# Altium footprint library SamacSys.PcbLib: 1008 footprints (part 10 of 63)
Each footprint in its own frame and in the unit in brackets; x right, y up, seen from the top. Pads: shape width x height; smd on the part's side, far side on the other; paste and mask are expansions set on the pad; w line width, h text height; cw(c..) or ccw(c..) is an arc to the next point about the centre after c.
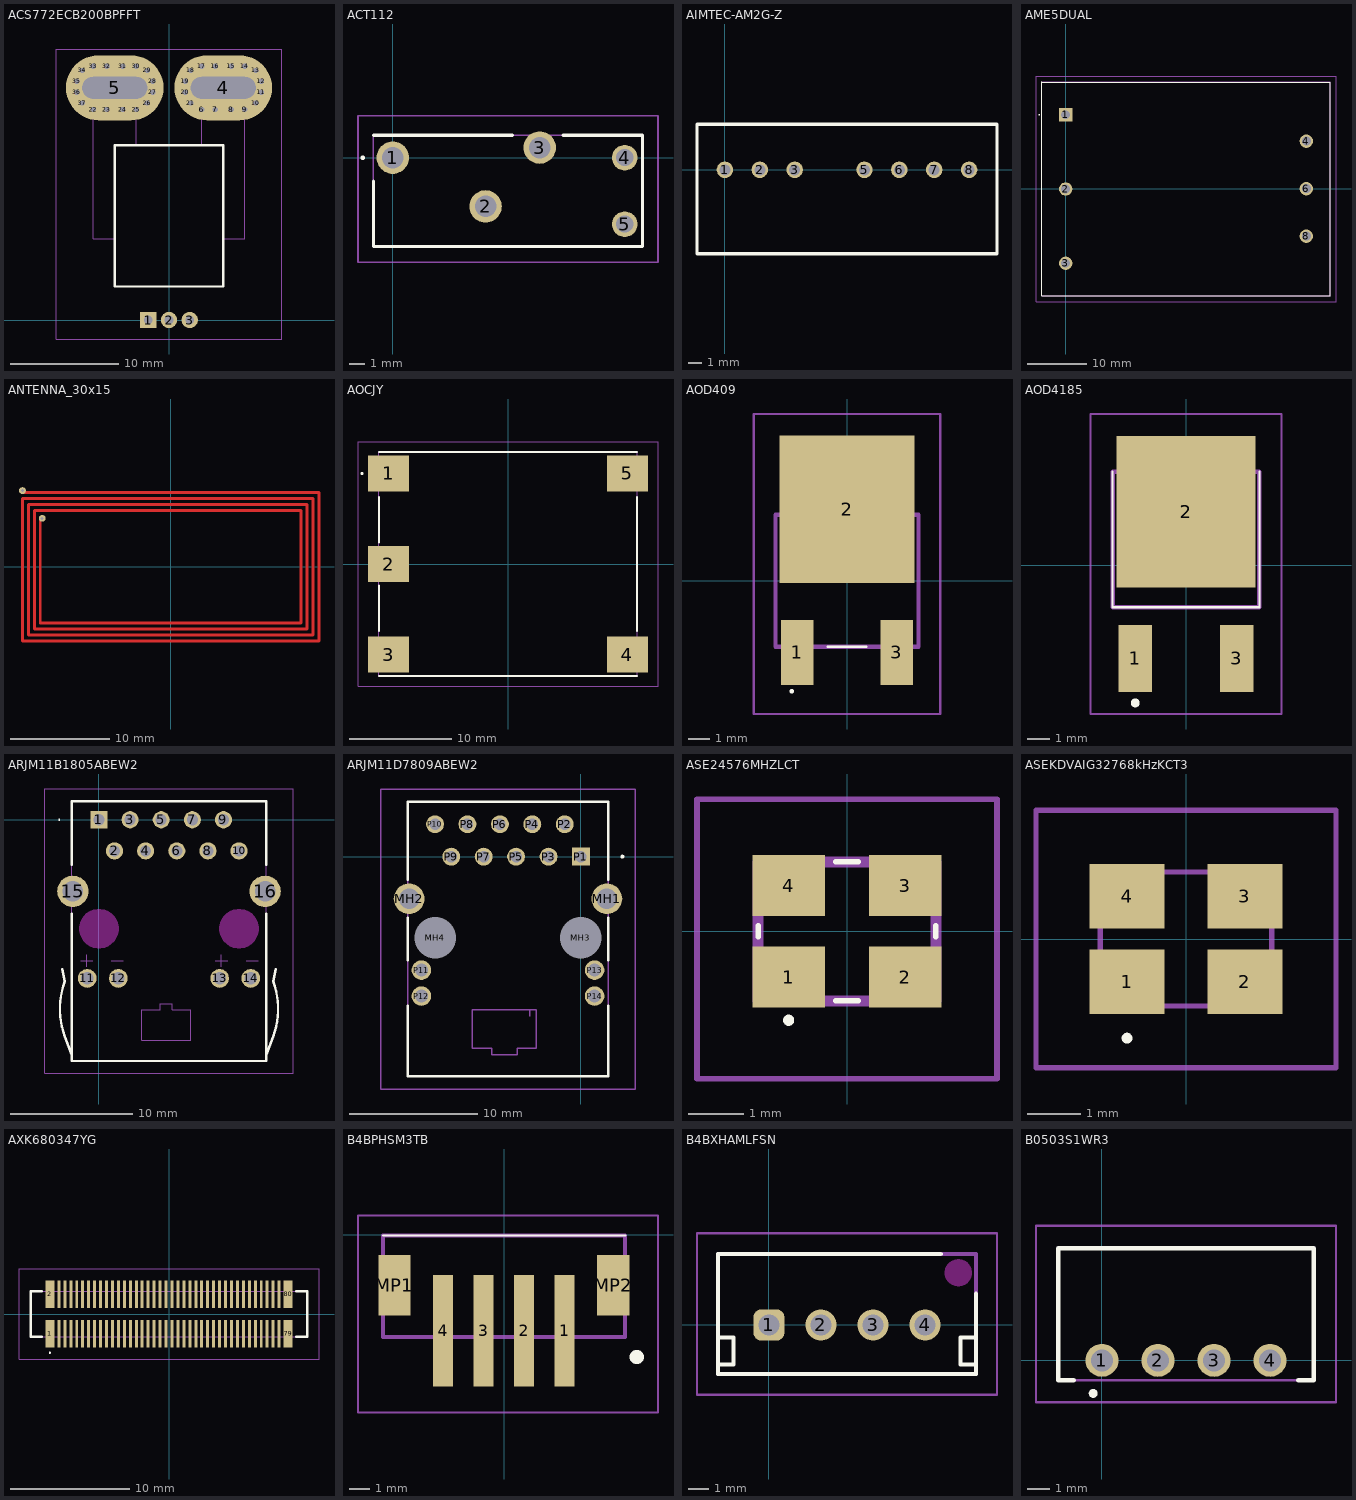
[diagram p9: the footprints below, top view; thin cyan lines are the x and y axes]

## ACS772ECB200BPFFT [mm]
pads (37):
  rect 1.5x1.5 hole 0.8: 1(-1.91,0)
  round 1.5 hole 0.8: 2(0,0) 3(1.91,0)
  oval 9x6 hole 2 slot 6 at 0 deg: 4(5,21.4) 5(-5,21.4)
  round 0.9 hole 0.5: 6(3,19.4) 7(4.25,19.4) 8(5.75,19.4) 9(7,19.4) 10(8,20) 11(8.5,21) 12(8.5,22) 13(8,23) 14(7,23.4) 15(5.75,23.4) 16(4.25,23.4) 17(3,23.4) 18(2,23) 19(1.5,22) 20(1.5,21) 21(2,20) 22(-7,19.4) 23(-5.75,19.4) 24(-4.25,19.4) 25(-3,19.4) 26(-2,20) 27(-1.5,21) 28(-1.5,22) 29(-2,23) 30(-3,23.4) 31(-4.25,23.4) 32(-5.75,23.4) 33(-7,23.4) 34(-8,23) 35(-8.5,22) 36(-8.5,21) 37(-8,20)
Top Overlay:
  lines w0.2: -5,3.1 5,3.1 5,16.1 -5,16.1 -5,3.1
Assembly:
  lines w0.1: -5,7.5 -7,7.5 -7,20.3 -3,20.3 -3,16.1 ; 3,16.1 3,20.3 7,20.3 7,7.5 5,7.5 ; -7,20.4 cw(c-7,21.4) -7,22.4 -3,22.4 cw(c-3,21.4) -3,20.4 -7,20.4 ; -5,3.1 5,3.1 5,16.1 -5,16.1 -5,3.1 ; 3,20.4 cw(c3,21.4) 3,22.4 7,22.4 cw(c7,21.4) 7,20.4 3,20.4
Countryard:
  lines w0.1: -10.402,-1.75 10.402,-1.75 10.402,24.95 -10.402,24.95 -10.402,-1.75
3D body "ACS758LCB-100B-PFF-T.stp": height 6.97, standoff -3.57, extent -6.972,-0.484 7.028,22.333

## ACT112 [mm]
pads (5):
  round 2.1 hole 1.4: 1(0,0) 2(6,-3.15) 3(9.5,0.65)
  round 1.65 hole 1.1: 4(15,0) 5(15,-4.3)
Top Overlay:
  lines w0.2: -2,0 cw(c-1.95,0) -1.9,0 ; -2,0 ccw(c-1.95,0) -1.9,0 ; -2,0 cw(c-1.95,0) -1.9,0 ; -1.25,-5.75 -1.25,-1.5 -1.25,-5.75 ; -1.25,-5.75 16.15,-5.75 ; -1.25,-5.75 16.15,-5.75 ; 16.15,-5.75 16.15,1.45 ; 16.15,-5.75 16.15,1.45 ; 16.15,1.45 11,1.45 16.15,1.45 ; -1.25,1.45 7.75,1.45 -1.25,1.45
Assembly:
  lines w0.1: -1.25,-5.75 -1.25,1.45 16.15,1.45 16.15,-5.75 -1.25,-5.75
Countryard:
  lines w0.1: -2.25,-6.75 -2.25,2.7 17.15,2.7 17.15,-6.75 -2.25,-6.75
3D body "ACT112.stp": height 13.9, standoff -5, extent -1.25,-5.75 16.15,1.45

## AIMTEC-AM2G-Z [mm]
height 10.6
pads (7):
  round 1.2 hole 0.8: 1(0,0) 2(2.54,0) 3(5.08,0) 5(10.16,0) 6(12.7,0) 7(15.24,0) 8(17.78,0)
Top Overlay:
  lines w0.254: -2.032,-6.096 -2.032,3.302 19.812,3.302 19.812,-6.096 -2.032,-6.096
Top Designator:
  text ".Designator" at 1.272,-1.905 h1.52
3D body "SIP-8.step": height 11.1, standoff -3.6, extent -2,-6 19.8,3.2

## AME5DUAL [mm]
pads (6):
  rect 2.25x2.25 hole 1.5: 1(0,12.446)
  round 2.25 hole 1.5: 2(0,-0.054) 3(0,-12.554) 4(40.5,8) 6(40.5,0) 8(40.5,-8)
Top Overlay:
  lines w0.1: -4.5,12.446 ccw(c-4.45,12.446) -4.4,12.446 ccw(c-4.45,12.446) -4.5,12.446
  lines w0.2: -4,-18.054 44.5,-18.054 44.5,17.946 -4,17.946 ; -4,-18 -4,18
Assembly:
  lines w0.1: -4,-18.054 -4,17.946 ; -4,-18 44.5,-18 44.5,18 -4,18
Countryard:
  lines w0.1: -5,-19.054 -5,18.946 45.5,18.946 45.5,-19.054 -5,-19.054
3D body "AME5-12SVZ.stp": height 21.1, standoff -5, extent -4,-18.054 44.5,17.946

## ANTENNA_30x15 [mm] "13.56MHz antenna 30*15mm"
pads (2):
  round 0.7 hole 0.3: 1(-15,7.7) 2(-13,4.9)
Top Layer:
  lines w0.3: -15,7.5 15,7.5 15,-7.5 -15,-7.5 -15,6.9 -13,6.9 14.4,6.9 14.4,-6.9 -14.4,-6.9 -14.4,6.3 13.8,6.3 13.8,-6.3 -13.8,-6.3 -13.8,5.7 13.2,5.7 13.2,-5.7 -13.2,-5.7 -13.2,4.9

## AOCJY [mm]
pads (5):
  rect 4x3.5 smd: 1(-11.75,8.9) 2(-11.75,0) 3(-11.75,-8.9) 4(11.75,-8.9) 5(11.75,8.9)
Top Overlay:
  lines w0.2: -12.7,-11 12.7,-11 ; -12.7,-6.6 -12.7,-2.1 ; -12.7,2.1 -12.7,6.6 ; -12.7,11 12.7,11 ; 12.7,-6.6 12.7,6.6 ; -14.4,8.9 cw(c-14.35,8.9) -14.3,8.9 ; -14.4,8.9 ccw(c-14.35,8.9) -14.3,8.9 ; -14.4,8.9 cw(c-14.35,8.9) -14.3,8.9
Assembly:
  lines w0.1: -12.7,-11 -12.7,11 12.7,11 12.7,-11 -12.7,-11
Countryard:
  lines w0.1: -14.75,-12 -14.75,12 14.75,12 14.75,-12 -14.75,-12
3D body "AOCJY-10.000MHZ.stp": height 12.7, standoff 0, extent -12.7,-11 12.7,11

## AOD409 [mm]
pads (3):
  rect 1.5x3 smd: 1(-2.286,-3.3) 3(2.286,-3.3)
  rect 6.25x6.8 smd: 2(0,3.3)
Top Overlay:
  lines w0.1: -0.9,-3.048 0.9,-3.048 ; -2.6,-5.1 cw(c-2.55,-5.1) -2.5,-5.1 cw(c-2.55,-5.1) -2.6,-5.1
Assembly:
  lines w0.2: -3.302,-3.048 -3.302,3.048 3.302,3.048 3.302,-3.048 -3.302,-3.048
Countryard:
  lines w0.1: -4.302,-6.15 -4.302,7.7 4.302,7.7 4.302,-6.15 -4.302,-6.15
3D body "AOD409.stp": height 2.39, standoff 0, extent -3.293,-4.129 3.293,5.904

## AOD4185 [mm]
pads (3):
  rect 1.5x3 smd: 1(-2.286,-4.2) 3(2.286,-4.2)
  rect 6.25x6.8 smd: 2(0,2.4)
Top Overlay:
  lines w0.1: -3.302,4.2 -3.302,-1.8 -3.302,-1.896 3.302,-1.896 3.302,4.2
  lines w0.2: -2.286,-6.3 ccw(c-2.286,-6.2) -2.286,-6.1 ccw(c-2.286,-6.2) -2.286,-6.3
Assembly:
  lines w0.2: -3.302,-1.896 -3.302,4.2 3.302,4.2 3.302,-1.896 -3.302,-1.896
Countryard:
  lines w0.1: -4.302,-6.7 -4.302,6.8 4.302,6.8 4.302,-6.7 -4.302,-6.7
3D body "AOD4185.stp": height 2.4, standoff 0, extent -3.3,-5 3.3,5.1

## ARJM11B1805ABEW2 [mm]
pads (16):
  rect 1.4x1.4 hole 0.9: 1(0,0)
  round 1.4 hole 0.9: 2(1.27,-2.54) 3(2.54,0) 4(3.81,-2.54) 5(5.08,0) 6(6.35,-2.54) 7(7.62,0) 8(8.89,-2.54) 9(10.16,0) 10(11.43,-2.54)
  round 1.53 hole 1.02: 11(-0.96,-12.95) 12(1.58,-12.95) 13(9.85,-12.95) 14(12.39,-12.95)
  round 2.55 hole 1.7: 15(-2.135,-5.84) 16(13.565,-5.84)
Top Overlay:
  lines w0.1: -3.3,0 cw(c-3.25,0) -3.2,0 cw(c-3.25,0) -3.3,0
  lines w0.2: -2.985,-12.19 -2.785,-13.19 ; -2.786,-17.686 cw(c3.352,-15.44) -2.782,-13.183 ; -2.785,-17.69 -2.235,-19.19 ; -2.235,-7.69 -2.235,-19.69 13.665,-19.69 13.665,-7.69 ; -2.235,-3.69 -2.235,1.51 13.665,1.51 13.665,-3.69 ; 13.665,-19.19 14.215,-17.69 ; 14.213,-13.183 cw(c8.079,-15.44) 14.217,-17.686 ; 14.215,-13.19 14.415,-12.19
Keep-Out Layer:
  board cut-out: -1.6,-8.89 -1.6,-9.048 -1.539,-9.357 -1.418,-9.648 -1.243,-9.91 -1.02,-10.133 -0.758,-10.308 -0.467,-10.429 -0.158,-10.49 0,-10.49 0.158,-10.49 0.467,-10.429 0.758,-10.308 1.02,-10.133 1.243,-9.91 1.418,-9.648 1.539,-9.357 1.6,-9.048 1.6,-8.89 1.6,-8.732 1.539,-8.423 1.418,-8.132 1.243,-7.87 1.02,-7.647 0.758,-7.472 0.467,-7.351 0.158,-7.29 0,-7.29 -0.158,-7.29 -0.467,-7.351 -0.758,-7.472 -1.02,-7.647 -1.243,-7.87 -1.418,-8.132 -1.539,-8.423 -1.6,-8.732
  board cut-out: 9.83,-8.89 9.83,-9.048 9.891,-9.357 10.012,-9.648 10.187,-9.91 10.41,-10.133 10.672,-10.308 10.963,-10.429 11.272,-10.49 11.43,-10.49 11.588,-10.49 11.897,-10.429 12.188,-10.308 12.45,-10.133 12.673,-9.91 12.848,-9.648 12.969,-9.357 13.03,-9.048 13.03,-8.89 13.03,-8.732 12.969,-8.423 12.848,-8.132 12.673,-7.87 12.45,-7.647 12.188,-7.472 11.897,-7.351 11.588,-7.29 11.43,-7.29 11.272,-7.29 10.963,-7.351 10.672,-7.472 10.41,-7.647 10.187,-7.87 10.012,-8.132 9.891,-8.423 9.83,-8.732
Assembly:
  lines w0.1: -2.985,-12.19 -2.785,-13.19 ; -2.786,-17.686 cw(c3.352,-15.44) -2.782,-13.183 ; -2.785,-17.69 -2.235,-19.19 ; -1.5,-11.5 -0.5,-11.5 ; -1,-12 -1,-11 ; 1,-11.5 2,-11.5 ; 9.5,-11.5 10.5,-11.5 ; 10,-12 10,-11 ; 12,-11.5 13,-11.5 ; 13.665,-19.19 14.215,-17.69 ; 14.213,-13.183 cw(c8.079,-15.44) 14.217,-17.686 ; 14.215,-13.19 14.415,-12.19 ; -2.235,-19.69 13.665,-19.69 13.665,1.51 -2.235,1.51 -2.235,-19.69 ; 3.5,-18 3.5,-15.5 5,-15.5 5,-15 6,-15 6,-15.5 7.5,-15.5 7.5,-18 4,-18 3.5,-18
Countryard:
  lines w0.1: -4.41,-20.69 15.84,-20.69 15.84,2.51 -4.41,2.51 -4.41,-20.69
3D body "ARJM11D7-809-AB-EW2.stp": height 14.15, standoff -5, extent -2.735,-19.74 14.165,1.76

## ARJM11D7809ABEW2 [mm]
pads (18):
  round 2.4 hole 1.6: MH1(2.035,-3.3) MH2(-13.465,-3.3)
  round 1.625 hole 3.25 unplated: MH3(0,-6.35) MH4(-11.43,-6.35)
  rect 1.4x1.4 hole 0.9: P1(0,0)
  round 1.4 hole 0.9: P2(-1.27,2.54) P3(-2.54,0) P4(-3.81,2.54) P5(-5.08,0) P6(-6.35,2.54) P7(-7.62,0) P8(-8.89,2.54) P9(-10.16,0) P10(-11.43,2.54)
  round 1.53 hole 1.02: P11(-12.5,-8.89) P12(-12.5,-10.92) P13(1.07,-8.89) P14(1.07,-10.92)
Top Overlay:
  lines w0.2: -13.565,-11.7 -13.565,-17.2 2.135,-17.2 2.135,-11.7 ; -13.565,-8.1 -13.565,-4.8 ; -13.565,-1.8 -13.565,4.3 2.135,4.3 2.135,-1.8 ; 2.135,-8.1 2.135,-4.8 ; 3.2,0 ccw(c3.25,0) 3.3,0 ; 3.2,0 cw(c3.25,0) 3.3,0 ; 3.2,0 ccw(c3.25,0) 3.3,0
Top Assembly:
  lines w0.1: -4,-12.5 -4,-12 ; -8.5,-15 -8.5,-12 -3.5,-12 -3.5,-15 -5,-15 -5,-15.5 -7,-15.5 -7,-15 -8.5,-15
Assembly:
  lines w0.1: -13.565,-17.2 -13.565,4.3 2.135,4.3 2.135,-17.2 -13.565,-17.2
Countryard:
  lines w0.1: -15.665,-18.2 -15.665,5.3 4.235,5.3 4.235,-18.2 -15.665,-18.2
3D body "ARJM11D7-809-AB-EW2.stp": height 14.15, standoff -5, extent -14.165,-17.2 2.735,4.3

## ASE24576MHZLCT [mm]
pads (4):
  rect 1.3x1.1 smd: 1(-1.05,-0.825) 2(1.05,-0.825) 3(1.05,0.825) 4(-1.05,0.825)
Top Overlay:
  lines w0.1: -1.6,-0.1 -1.6,0.1 ; -0.2,-1.25 0.2,-1.25 ; -0.2,1.25 0.2,1.25 ; 1.6,-0.1 1.6,0.1 ; -1.1,-1.6 ccw(c-1.05,-1.6) -1,-1.6 ccw(c-1.05,-1.6) -1.1,-1.6
Assembly:
  lines w0.2: -1.6,-1.25 -1.6,1.25 1.6,1.25 1.6,-1.25 -1.6,-1.25
Countryard:
  lines w0.1: -2.7,-2.65 -2.7,2.375 2.7,2.375 2.7,-2.65 -2.7,-2.65
3D body "ASE-10.000MHZ-LC-T.stp": height 1.2, standoff 0, extent -1.6,-1.25 1.6,1.25

## ASEKDVAIG32768kHzKCT3 [mm]
pads (4):
  rect 1.4x1.2 smd: 1(-1.1,-0.8) 2(1.1,-0.8) 3(1.1,0.8) 4(-1.1,0.8)
Top Overlay:
  lines w0.1: -1.1,-1.9 ccw(c-1.1,-1.85) -1.1,-1.8 ccw(c-1.1,-1.85) -1.1,-1.9
Assembly:
  lines w0.1: -1.6,-1.25 -1.6,1.25 1.6,1.25 1.6,-1.25 -1.6,-1.25
Countryard:
  lines w0.1: -2.8,-2.4 -2.8,2.4 2.8,2.4 2.8,-2.4 -2.8,-2.4
3D body "ASEKDVAIG-32.768kHz-KC-T3.stp": height 1.3, standoff 0, extent -1.68,-1.28 1.68,1.28

## AXK680347YG [mm]
pads (80):
  rect 0.75x2.3 smd: 1(-10,-1.65) 2(-10,1.65) 79(10,-1.65) 80(10,1.65)
  rect 0.25x2.3 smd: 3(-9.25,-1.65) 4(-9.25,1.65) 5(-8.75,-1.65) 6(-8.75,1.65) 7(-8.25,-1.65) 8(-8.25,1.65) 9(-7.75,-1.65) 10(-7.75,1.65) 11(-7.25,-1.65) 12(-7.25,1.65) 13(-6.75,-1.65) 14(-6.75,1.65) 15(-6.25,-1.65) 16(-6.25,1.65) 17(-5.75,-1.65) 18(-5.75,1.65) 19(-5.25,-1.65) 20(-5.25,1.65) 21(-4.75,-1.65) 22(-4.75,1.65) 23(-4.25,-1.65) 24(-4.25,1.65) 25(-3.75,-1.65) 26(-3.75,1.65) 27(-3.25,-1.65) 28(-3.25,1.65) 29(-2.75,-1.65) 30(-2.75,1.65) 31(-2.25,-1.65) 32(-2.25,1.65) 33(-1.75,-1.65) 34(-1.75,1.65) 35(-1.25,-1.65) 36(-1.25,1.65) 37(-0.75,-1.65) 38(-0.75,1.65) 39(-0.25,-1.65) 40(-0.25,1.65) 41(0.25,-1.65) 42(0.25,1.65) 43(0.75,-1.65) 44(0.75,1.65) 45(1.25,-1.65) 46(1.25,1.65) 47(1.75,-1.65) 48(1.75,1.65) 49(2.25,-1.65) 50(2.25,1.65) 51(2.75,-1.65) 52(2.75,1.65) 53(3.25,-1.65) 54(3.25,1.65) 55(3.75,-1.65) 56(3.75,1.65) 57(4.25,-1.65) 58(4.25,1.65) 59(4.75,-1.65) 60(4.75,1.65) 61(5.25,-1.65) 62(5.25,1.65) 63(5.75,-1.65) 64(5.75,1.65) 65(6.25,-1.65) 66(6.25,1.65) 67(6.75,-1.65) 68(6.75,1.65) 69(7.25,-1.65) 70(7.25,1.65) 71(7.75,-1.65) 72(7.75,1.65) 73(8.25,-1.65) 74(8.25,1.65) 75(8.75,-1.65) 76(8.75,1.65) 77(9.25,-1.65) 78(9.25,1.65)
Top Overlay:
  lines w0.1: -10,-3.3 ccw(c-10,-3.25) -10,-3.2 ccw(c-10,-3.25) -10,-3.3
  lines w0.2: -10.7,-1.9 -11.6,-1.9 -11.6,1.9 -10.7,1.9 ; 10.7,-1.9 11.6,-1.9 11.6,1.9 10.7,1.9
Assembly:
  lines w0.1: -11.6,-1.9 -11.6,1.9 11.6,1.9 11.6,-1.9 -11.6,-1.9
Countryard:
  lines w0.1: -12.6,-3.8 -12.6,3.8 12.6,3.8 12.6,-3.8 -12.6,-3.8
3D body "AXK680347YG.stp": height 2.4, standoff 0, extent -11.6,-2.3 11.6,2.3

## B4BPHSM3TB [mm]
pads (6):
  rect 1x5.5 smd: 1(2.987,-4.75) 2(0.987,-4.75) 3(-1.013,-4.75) 4(-3.013,-4.75)
  rect 1.6x3 smd: MP1(-5.413,-2.5) MP2(5.388,-2.5)
Top Overlay:
  lines w0.1: -5.987,-0.04 5.987,-0.04
  lines w0.6: 6.5,-6.04 cw(c6.55,-6.04) 6.6,-6.04 cw(c6.55,-6.04) 6.5,-6.04
Assembly:
  lines w0.2: -5.987,-5.04 -5.987,-0.04 5.962,-0.04 5.962,-5.04 -5.987,-5.04
Countryard:
  lines w0.1: -7.213,-8.79 -7.213,0.96 7.6,0.96 7.6,-8.79 -7.213,-8.79
3D body "B4B-PH-SM3-TB.stp": height 6.7, standoff 0, extent -6.053,-7.4 6.028,-0.04

## B4BXHAMLFSN [mm]
pads (4):
  rrect50% 1.5x1.5 hole 1: 1(0,0)
  round 1.5 hole 1: 2(2.5,0) 3(5,0) 4(7.5,0)
Top Overlay:
  lines w0.2: -2.45,-2.35 9.95,-2.35 9.95,1.5 ; -2.45,-2.3 -2.45,3.4 8.25,3.4 ; -2.4,-1.9 -1.7,-1.9 -1.7,-0.6 -2.4,-0.6 ; 9.9,-1.9 9.2,-1.9 9.2,-0.6 9.9,-0.6
Top Solder:
  region: 9.1,1.6 9.011,1.6 8.837,1.635 8.674,1.702 8.526,1.801 8.401,1.926 8.302,2.074 8.235,2.237 8.2,2.411 8.2,2.5 8.2,2.589 8.235,2.763 8.302,2.926 8.401,3.074 8.526,3.199 8.674,3.298 8.837,3.365 9.011,3.4 9.1,3.4 9.189,3.4 9.363,3.365 9.526,3.298 9.674,3.199 9.799,3.074 9.898,2.926 9.965,2.763 10,2.589 10,2.5 10,2.411 9.965,2.237 9.898,2.074 9.799,1.926 9.674,1.801 9.526,1.702 9.363,1.635 9.189,1.6
Keep-Out Layer:
  board cut-out: 9.1,1.85 9.036,1.85 8.91,1.875 8.792,1.924 8.686,1.995 8.595,2.086 8.524,2.192 8.475,2.31 8.45,2.436 8.45,2.5 8.45,2.564 8.475,2.69 8.524,2.808 8.595,2.914 8.686,3.005 8.792,3.076 8.91,3.125 9.036,3.15 9.1,3.15 9.164,3.15 9.29,3.125 9.408,3.076 9.514,3.005 9.605,2.914 9.676,2.808 9.725,2.69 9.75,2.564 9.75,2.5 9.75,2.436 9.725,2.31 9.676,2.192 9.605,2.086 9.514,1.995 9.408,1.924 9.29,1.875 9.164,1.85
Assembly:
  lines w0.2: -2.45,-2.35 9.95,-2.35 9.95,3.4 -2.45,3.4 -2.45,-2.35
Countryard:
  lines w0.1: -3.45,-3.35 10.95,-3.35 10.95,4.4 -3.45,4.4 -3.45,-3.35
3D body "B4B-XH-AM__LF__SN_.stp": height 6.9, standoff -3.5, extent -2.45,-2.355 9.95,3.395

## B0503S1WR3 [mm]
pads (4):
  round 1.5 hole 1: 1(0,0) 2(2.54,0) 3(5.08,0) 4(7.62,0)
Top Overlay:
  lines w0.2: -1.27,-0.9 -1.99,-0.9 -1.99,5.08 9.61,5.08 9.61,-0.9 8.89,-0.9 ; -0.5,-1.5 ccw(c-0.4,-1.5) -0.3,-1.5 ccw(c-0.4,-1.5) -0.5,-1.5
Assembly:
  lines w0.1: -1.99,-0.9 9.61,-0.9 9.61,5.1 -1.99,5.1 -1.99,-0.9
Countryard:
  lines w0.1: -2.99,-1.9 10.61,-1.9 10.61,6.1 -2.99,6.1 -2.99,-1.9
3D body "B0503S-1WR3.stp": height 10.51, standoff -5, extent -1.99,-0.9 9.61,5.1